# EAGLE library part 6101XX249121_610116249121 (library WR-PHD)
WR-PHD 2.54 mm SMT Pin Header Double Row Right Angled ARTICLE PROPERTIES: Pins:6;​ 8;​ 10;​ 12;​ 14;​ 16;​ 20;​ 22;​ 24;​ 26 KIND PROPERTIES: Pitch：2.54 mm Rows：Dual Gender：Pin Header Type：Angled MATERIAL PROPERTIES: Insulator Material PA9T Insulator Flammability Rating:UL94 V-0 Contact Material:Copper Alloy Contact Plating:Gold Contact Type:Stamped GENERAL INFORMATION Operating Temperature:-40 up to +105 °C ELECTRICAL PROPERTIES: Withstanding Voltage 600 V (AC) Contact Resistance 20 mΩ RISO 1000 MΩ CERTIFICATION UL Approval E323964 PACKAGING PROPERTIES Packaging:Tape and Reel <https://www.we-online.com/catalog/media/o33203v209%20Family_WR-PHD_6101_xx249121.jpg> Details see: https://www.we-online.com/catalog/en/PHD_2_54_SMT_DOUBLE_ROW_RIGHT_ANGLED_PIN_HEADER_6101XX249121 Updated by Ella Wu 2021-12-08 2021 (C) Würth Elektronik
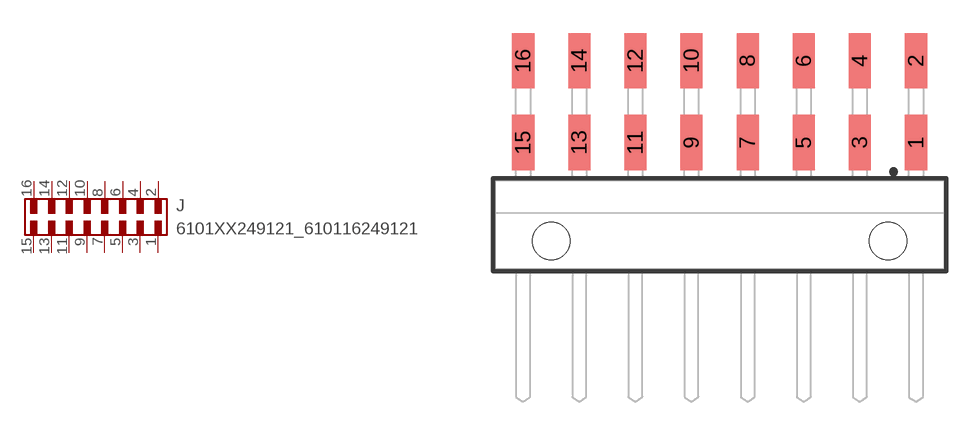
[diagram p173: symbol with the pads of 610116249121; footprint 610116249121]

Designator prefix J

## 6101XX249121_610116249121 (DATASHEET-URL: https://www.we-online.com/redexpert/spec/610116249121?ae; GENDER: Pin Header; IR: 3A; MOUNT: SMT; PACKAGING: Tape and Reel; PART-NUMBER: 610116249121; PINS: 16; PITCH: 2.54 mm; ROWS: Dual; TYPE: Angled; VALUE: 610116249121)  [610116249121]
1  1  pas
2  2  pas
3  3  pas
4  4  pas
5  5  pas
6  6  pas
7  7  pas
8  8  pas
9  9  pas
10  10  pas
11  11  pas
12  12  pas
13  13  pas
14  14  pas
15  15  pas
16  16  pas

## Footprint 610116249121 (pad centres in mm)
WR-PHD SMT Pin Header Double Row Right Angled,16Pins
smd 1 x 2.5: 1 8.89,4.45; 2 8.89,8.15; 3 6.35,4.45; 4 6.35,8.15; 5 3.81,4.45; 6 3.81,8.15; 7 1.27,4.45; 8 1.27,8.15; 9 -1.27,4.45; 10 -1.27,8.15; 11 -3.81,4.45; 12 -3.81,8.15; 13 -6.35,4.45; 14 -6.35,8.15; 15 -8.89,4.45; 16 -8.89,8.15
hole 1.68 at 7.62,0
hole 1.68 at -7.62,0